# Altium schematic symbol library Connector-2.SchLib: 96 symbols (part 2 of 2)
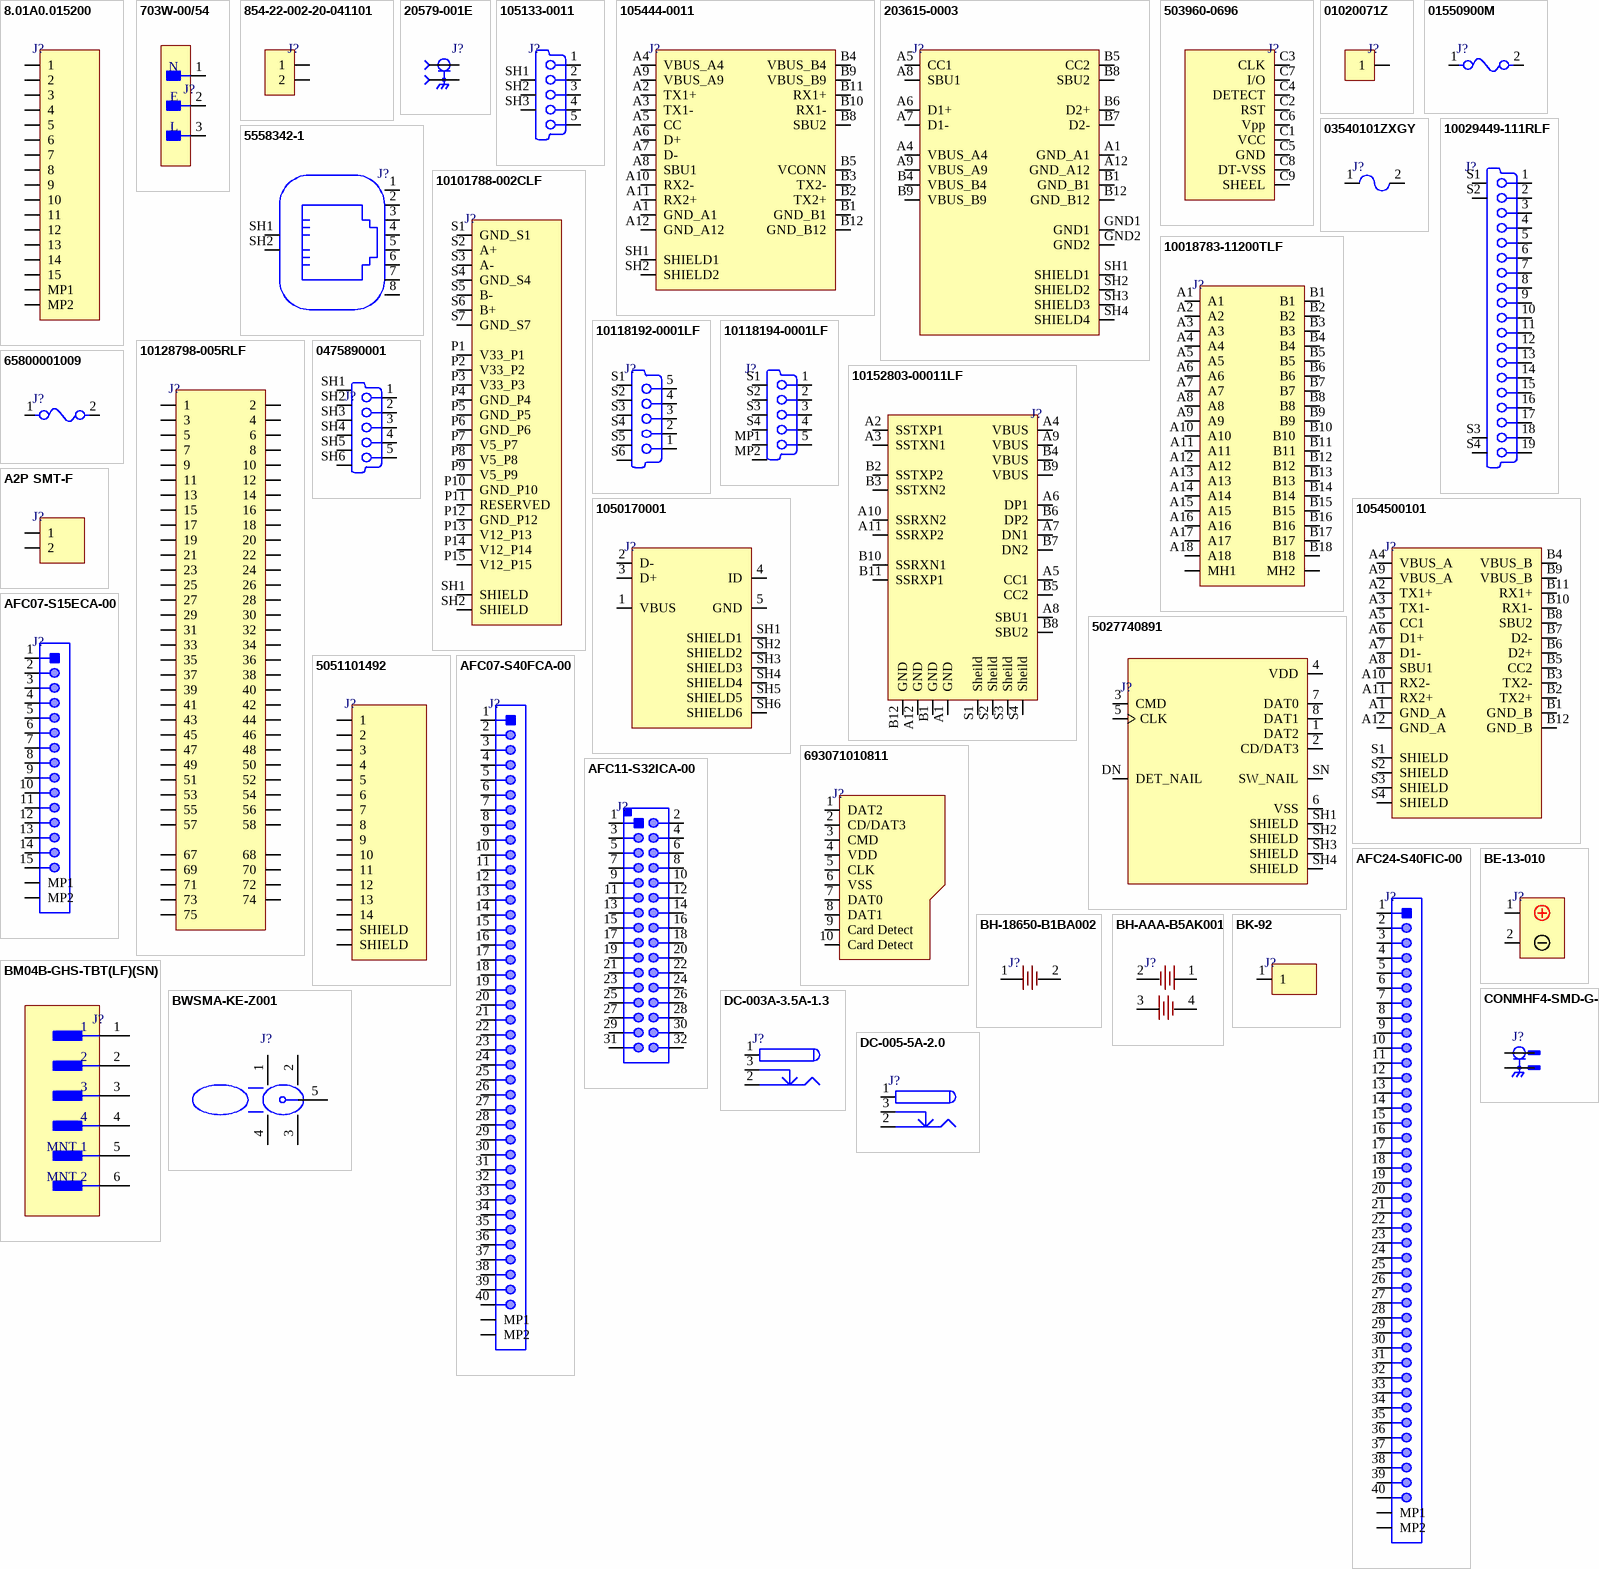
[diagram p3: symbols 8.01A0.015200 to DC-005-5A-2.0]

## BM04B-GHS-TBT(LF)(SN)
designator J?
CONN HEADER SMD 4POS 1.25MM; Manufacturer: JST; Manufacturer Part Number: BM04B-GHS-TBT(LF)(SN); Item Type: Card Edge Connectors; Contact Resistance: 50mΩ; Current Rating: 1A; Gender: Male; Insulation Resistance: 100MΩ; Number of Contacts: 4; Voltage Rating: 50V; Wire/Cable Gauge: 26AWG; Supplier: Future Electronics; Supplier Part Number: 7604226; RoHS: Compliant; Pricing: 2500=0.205, 5000=0.2, 7500=0.199, 10000=0.197 (USD); Case/Package: SMD/SMT; China RoHS: Compliant; Contact Gender: Male; Contact Material: Tin; Contact Plating: Tin; Height: 4.05mm; Housing Color: Natural; Housing Material: Nylon; Lead Free: Lead Free; Lifecycle Status: Production; Max Operating Temperature: 85°C; Min Operating Temperature: -25°C; Pins: 4; Number of Positions: 4; Number of Rows: 1; Orientation: Straight; Packaging: Cut Tape; Pitch: 1.25mm; REACH SVHC: No; Schedule B: 8536694040; Terminal Pitch: 1.25mm; Termination: Crimp; Voltage Rating (AC): 50V; ComponentLink1URL: https://datasheet.octopart.com:443/BM04B-GHS-TBT%28LF%29%28SN%29-JST-datasheet-151632282.pdf?src-supplier=IHS; ComponentLink1Description: https://datasheet.octopart.com:443/BM04B-GHS-TBT%28LF%29%28SN%29-JST-datasheet-151632282.pdf?src-supplier=IHS; ComponentLink2URL: https://datasheet.octopart.com:443/BM04B-GHS-TBT%28LF%29%28SN%29-JST-datasheet-13551083.pdf?src-supplier=Future+Electronics; ComponentLink2Description: https://datasheet.octopart.com:443/BM04B-GHS-TBT%28LF%29%28SN%29-JST-datasheet-13551083.pdf?src-supplier=Future+Electronics; ComponentLink3URL: https://datasheet.octopart.com:443/BM04B-GHS-TBT%28LF%29%28SN%29-JST-datasheet-12527556.pdf?src-supplier=Future+Electronics; ComponentLink3Description: https://datasheet.octopart.com:443/BM04B-GHS-TBT%28LF%29%28SN%29-JST-datasheet-12527556.pdf?src-supplier=Future+Electronics; ComponentLink4URL: https://datasheet.octopart.com:443/BM04B-GHS-TBT%28LF%29%28SN%29-JST-datasheet-10511.pdf?src-supplier=DigiKey; ComponentLink4Description: https://datasheet.octopart.com:443/BM04B-GHS-TBT%28LF%29%28SN%29-JST-datasheet-10511.pdf?src-supplier=DigiKey
footprint BM04B-GHS-TBT
pins: 1, 2, 3, 4, 5 MNT 1, 6 MNT 2

## BWSMA-KE-Z001
designator J?
1 Inner Bore SMA Board Side Positive Pin -65℃~+165℃ 50Ω Through Hole Coaxial Connector (RF) Assemblies RoHS; Manufacturer: BAT WIRELESS; Manufacturer Part Number: BWSMA-KE-Z001; Package: Custom; LCSC Part Number: C496549; Item Type: Connector; ComponentLink1Description: LCSC; ComponentLink1URL: https://www.lcsc.com/product-detail/C496549.html
footprint BWSMA-KE-Z001
pins: 1, 2, 3, 4, 5

## CONMHF4-SMD-G-T
designator J?
CONN MHF4 JACK STR SMD; Manufacturer: TE Connectivity; Manufacturer Part Number: CONMHF4-SMD-G-T; Item Type: Connectors; Number of Positions: 1; Supplier: Mouser; Supplier Part Number: 712-CONMHF4-SMD-G-T; RoHS: No; Stock: 14009; Pricing: 1=0.35, 10=0.35, 50=0.35, 100=0.345, 1000=0.26, 10000=0.26 (USD)
footprint CONMHF4-SMD-G-T
pins: 1, S1 2, S2 2, S3 2

## DC-003A-3.5A-1.3
designator J?
Bend insert DC Power Receptacle -20℃~+70℃ 1.3mm 5mm 3.5A 24V Plugin DC Power Connectors ROHS; Manufacturer: XKB Connection; Manufacturer Part Number: DC-003A-3.5A-1.3; Item Type: DC Connector; Package: Plugin; LCSC Part Number: C779945; ComponentLink1Description: LCSC; ComponentLink1URL: https://www.lcsc.com/product-detail/DC-Power-Connectors_XKB-Connection-DC-003A-3-5A-1-3_C779945.html
footprint DC-003A-3.5A-1.3
pins: 1 (power), 2 (power), 3 (power)

## DC-005-5A-2.0
designator J?
Bend insert DC Power Receptacle -20℃~+70℃ 2mm 6.2mm 5A 24V Plugin DC Power Connectors ROHS; Manufacturer: XKB Connection; Manufacturer Part Number: DC-005-5A-2.0; Item Type: DC Connector; Package: Plugin; LCSC Part Number: C381116; ComponentLink1Description: LCSC; ComponentLink1URL: https://www.lcsc.com/product-detail/DC-Power-Connectors_XKB-Connection-DC-005-5A-2-0_C381116.html
footprint DC-005-5A-2.0
pins: 1 (power), 2 (power), 3 (power)

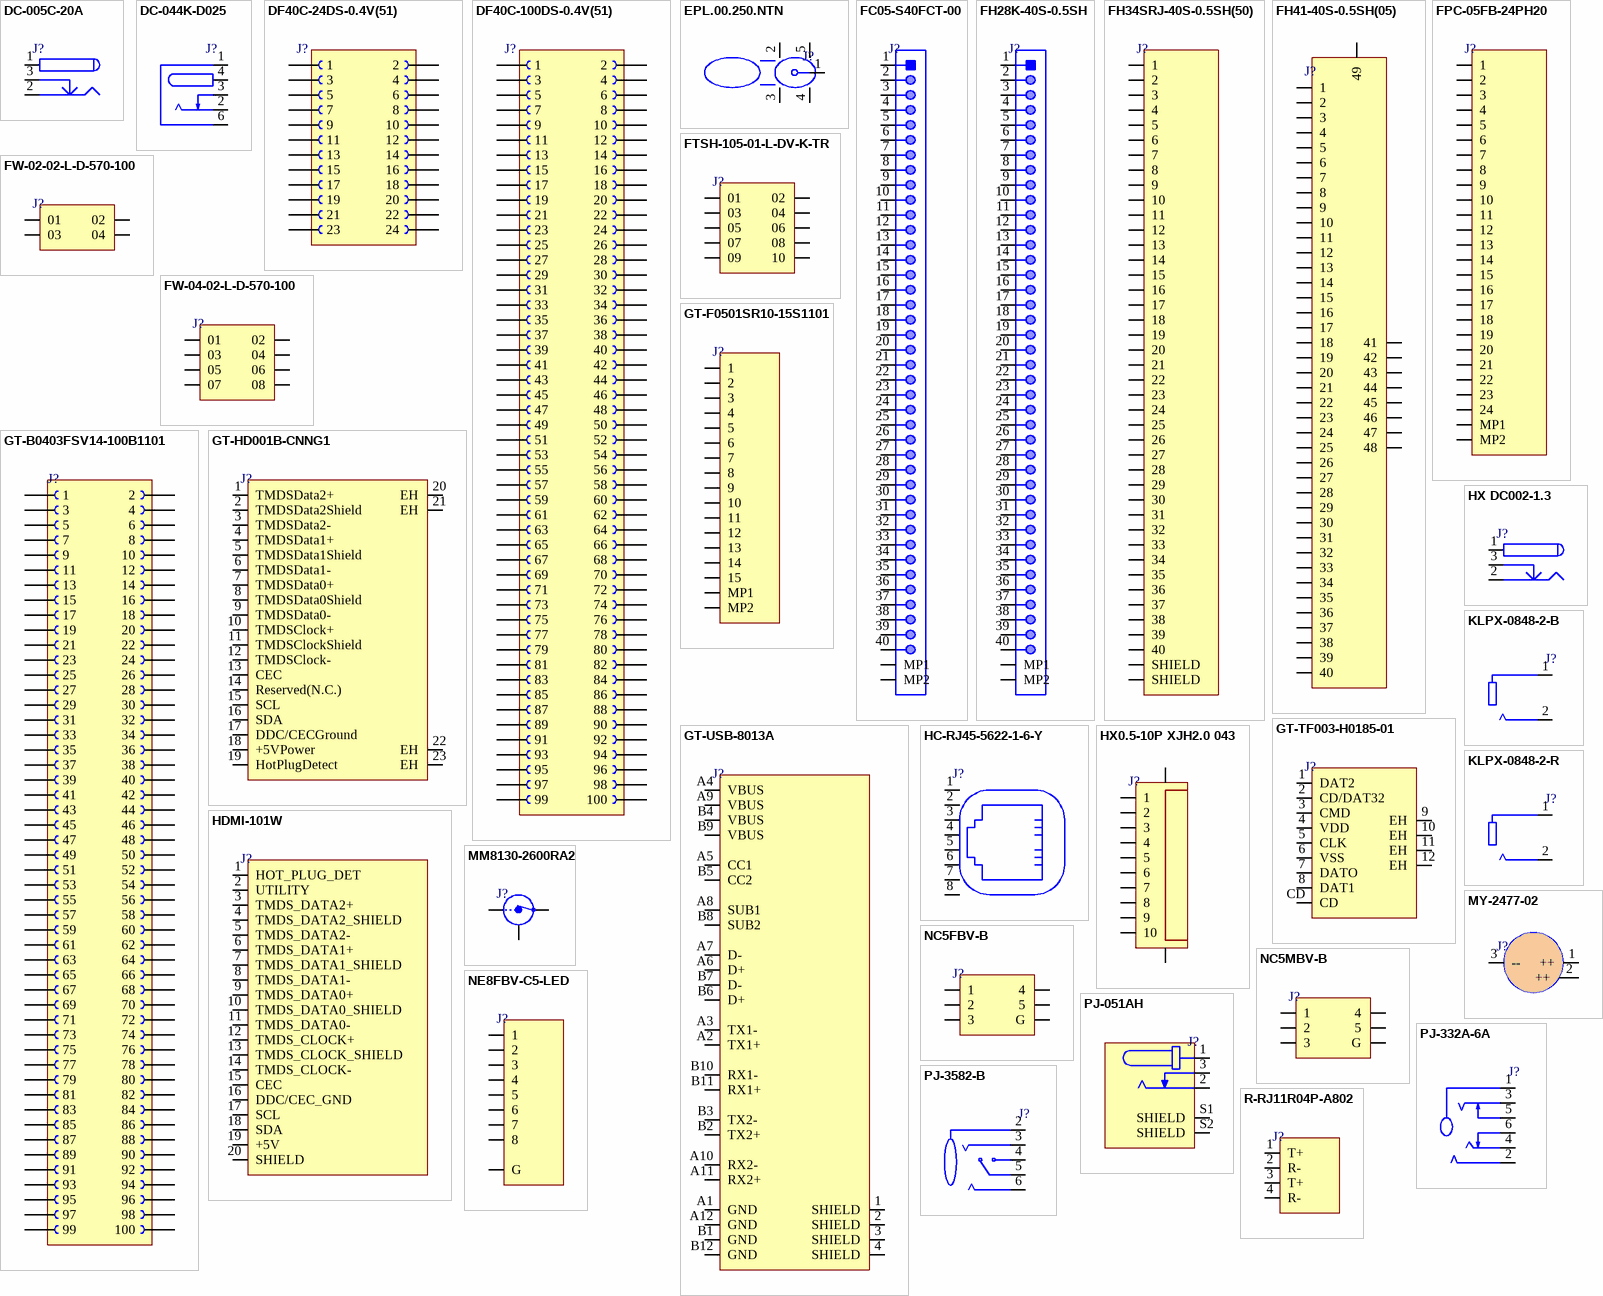
[diagram p1: symbols DC-005C-20A to R-RJ11R04P-A802]

## DC-005C-20A
designator J?
Bend insert DC Power Receptacle -20℃~+70℃ 2mm 6.4mm 3A 24V Plugin DC Power Connectors ROHS; Manufacturer: Korean Hroparts Elec; Manufacturer Part Number: DC-005C-20A; Item Type: DC Connector; Package: Plugin; LCSC Part Number: C84007; ComponentLink1Description: LCSC; ComponentLink1URL: https://www.lcsc.com/product-detail/DC-Power-Connectors_Korean-Hroparts-Elec-DC-005C-20A_C84007.html
footprint DC-005C-20A
pins: 1 (power), 2 (power), 3 (power)

## DC-044K-D025
designator J?
Bend insert DC Power Receptacle -30℃~+85℃ 2.5mm 6mm 7A 24V Plugin DC Power Connectors ROHS; Manufacturer: G-Switch; Manufacturer Part Number: DC-044K-D025; Package: Plugin; LCSC Part Number: C963204; Item Type: DC Power Connectors; ComponentLink1Description: LCSC; ComponentLink1URL: https://www.lcsc.com/product-detail/DC-Power-Connectors_G-Switch-DC-044K-D025_C963204.html
footprint DC-044K-D025
pins: 1, 2, 3, 4, 6

## DF40C-24DS-0.4V(51)
designator J?
CONN RCPT 24POS SMD GOLD; Manufacturer: Hirose; Manufacturer Part Number: DF40C-24DS-0.4V(51); Item Type: Connectors; Contact Resistance: 90mR; Contact Voltage Rating (AC): 30V; Contact Pitch: 400um; Supplier: Digikey; LCSC Part Number: C424640; RoHS: Yes; Stock: 2445; Pricing: 1=0.64, 10=0.518, 25=0.4772, 50=0.4486, 100=0.4218, 250=0.3888, 500=0.36562, 1000=0.34382, 2500=0.317 (USD); Housing Color: 46Colour; Contact Voltage Rating (DC): 30V; Orientation: 5491OrientationType; Length: 7.4mm; Width: 3.38mm; Height: 1.45mm; Lead Free: 5697LeadFree; ComponentLink1URL: https://datasheet.ciiva.com/46408/1824826-46408901.pdf?src-supplier=Element14; ComponentLink1Description: https://datasheet.ciiva.com/46408/1824826-46408901.pdf?src-supplier=Element14
footprint DF40C-24DS-0.4V(51)
pins: 1, 2, 3, 4, 5, 6, 7, 8, 9, 10, 11, 12, 13, 14, 15, 16, 17, 18, 19, 20, 21, 22, 23, 24

## DF40C-100DS-0.4V(51)
designator J?
CONN RCPT 100POS SMD GOLD; Manufacturer: Hirose; Manufacturer Part Number: DF40C-100DS-0.4V(51); Item Type: Card Edge Connectors; Contact Resistance: 90mR; Voltage Rating: 30V; Current Rating: 300mA; Connector Type: Receptacle; Number of Positions: 100; Pitch: 0.4mm; Mated Stacking Heights: 1.5mm; Contact Pitch: 400um; LCSC Part Number: C597931; ComponentLink1URL: https://datasheet.ciiva.com/11746/0900766b80e0bfd2-11746269.pdf?src-supplier=Rs; ComponentLink1Description: https://datasheet.ciiva.com/11746/0900766b80e0bfd2-11746269.pdf?src-supplier=Rs; ComponentLink2URL: https://datasheet.ciiva.com/46408/1824826-46408902.pdf?src-supplier=Element14; ComponentLink2Description: https://datasheet.ciiva.com/46408/1824826-46408902.pdf?src-supplier=Element14; Supplier: Avnet; Supplier Part Number: DF40C-100DS-0.4V(51); RoHS: Yes; Stock: 5000; Pricing: 5000=0.98765 (USD); Mounting Technology: Surface Mount; Contact Material: Bronze; Contact Plating: Gold; Housing Color: Black; Housing Material: Polymer; Min Operating Temperature: -35°C; Max Operating Temperature: 85°C; Number of Rows: 2; Packaging: Tape and Reel; Package Quantity: 1; Termination: SMD/SMT; Number of Contacts: 100; Orientation: Straight; Series: DF40; Contact Voltage Rating (AC): 30V; Contact Voltage Rating (DC): 30V; Max Current Rating: 300mA; Max Voltage Rating (AC): 30V; Gender: Receptacle; Length: 22.6mm; Depth: 3.38mm; Radiation Hardening: No; Reach SVHC Compliant: No; Lead Free: Lead Free; RoHS Compliant: Yes; ComponentLink3URL: https://datasheet.ciiva.com/26948/getdatasheetpartid-441624-26948933.pdf?src-supplier=Verical; ComponentLink3Description: https://datasheet.ciiva.com/26948/getdatasheetpartid-441624-26948933.pdf?src-supplier=Verical; ComponentLink4URL: https://datasheet.ciiva.com/46408/1824826-46408894.pdf?src-supplier=Element14; ComponentLink4Description: https://datasheet.ciiva.com/46408/1824826-46408894.pdf?src-supplier=Element14
footprint DF40C-100DS-0.4V(51)
pins: 1, 2, 3, 4, 5, 6, 7, 8, 9, 10, 11, 12, 13, 14, 15, 16, 17, 18, 19, 20, 21, 22, 23, 24, 25, 26, 27, 28, 29, 30, 31, 32, 33, 34, 35, 36, 37, 38, 39, 40, 41, 42, 43, 44, 45, 46, 47, 48, 49, 50, 51, 52, 53, 54, 55, 56, 57, 58, 59, 60, 61, 62, 63, 64, 65, 66, 67, 68, 69, 70, 71, 72, 73, 74, 75, 76, 77, 78, 79, 80, 81, 82, 83, 84, 85, 86, 87, 88, 89, 90, 91, 92, 93, 94, 95, 96, 97, 98, 99, 100

## EPL.00.250.NTN
designator J?
CONN NIMCAMAC RCPT R/A 50OHM PCB; Manufacturer: LEMO; Manufacturer Part Number: EPL.00.250.NTN; Item Type: RF / Coaxial Connectors; Insulation Resistance: 1.012kR; Voltage Rating (DC): 700V; Supplier: Mouser; Supplier Part Number: 736-EPL00250NTN; RoHS: Yes; Stock: 2913; Pricing: 1=21.95, 10=18.15, 50=16.05, 100=14.79, 1000=13.95, 10000=13.95 (USD); Insulation Material: 5766ConductorMaterial; ComponentLink1URL: https://datasheet.ciiva.com/7638/1775425-7638845.pdf?src-supplier=Element14; ComponentLink1Description: https://datasheet.ciiva.com/7638/1775425-7638845.pdf?src-supplier=Element14; ComponentLink2URL: https://datasheet.ciiva.com/646/epl-00-250-ntn-646197.pdf?src-supplier=Digikey; ComponentLink2Description: https://datasheet.ciiva.com/646/epl-00-250-ntn-646197.pdf?src-supplier=Digikey
footprint EPL.00.250.NTN
pins: 1, 2, 3, 4, 5

## FC05-S40FCT-00
designator J?
SMD,P=0.5mm,Surface Mount，Right Angle; Manufacturer: DEALON; Manufacturer Part Number: FC05-S40FCT-00; Item Type: FFC, FPC Connector; Package: SMD,P=0.5mm,Surface Mount，Right Angle; LCSC Part Number: C2998841; ComponentLink1Description: LCSC; ComponentLink1URL: https://www.lcsc.com/product-detail/FFC-FPC-Flat-Flexible-Connector-Assemblies_DEALON-FC05-S40FCT-00_C2998841.html
footprint FC05-S40FCT-00_
pins: 1, 2, 3, 4, 5, 6, 7, 8, 9, 10, 11, 12, 13, 14, 15, 16, 17, 18, 19, 20, 21, 22, 23, 24, 25, 26, 27, 28, 29, 30, 31, 32, 33, 34, 35, 36, 37, 38, 39, 40, MP1, MP2

## FH28K-40S-0.5SH
designator J?
SMD,P=0.5mm,Surface Mount,Right Angle; Manufacturer: HRS; Manufacturer Part Number: FH28K-40S-0.5SH; Item type: Connector; Package: SMD, P=0.5mm; LCSC Part Number: C3169685
footprint FH28K-40S-0.5SH
pins: 1, 2, 3, 4, 5, 6, 7, 8, 9, 10, 11, 12, 13, 14, 15, 16, 17, 18, 19, 20, 21, 22, 23, 24, 25, 26, 27, 28, 29, 30, 31, 32, 33, 34, 35, 36, 37, 38, 39, 40, MP1, MP2

## FH34SRJ-40S-0.5SH(50)
designator J?
CONN FFC FPC 40POS 0.5MM R/A; Manufacturer: Hirose; Manufacturer Part Number: FH34SRJ-40S-0.5SH(50); Item Type: FFC / FPC Connector; Actuator Material: Nylon,Polyamide; Actuator Color: Black; Number of Positions: 40; Voltage Rating: 50V; Current Rating: 500mA; Mating Cycles: 20; Pitch: 0.02inch; Supplier: Digikey; LCSC Part Number: C506798; RoHS: Yes; Stock: 2275; Pricing: 1=1.39, 10=1.129, 25=1.0408, 50=0.9788, 100=0.9203, 250=0.84848, 500=0.7979, 1000=0.75036, 2500=0.69185 (USD); Mounting Technology: Surface Mount; Pins: 40; Contact Material: Bronze; Contact Plating: Gold; Housing Material: Polymer; Housing Color: Grey; Min Operating Temperature: -55°C; Max Operating Temperature: 85°C; Packaging: Tape and Reel; Termination: Solder; Series: FH34SRJ; Flammability Rating: UL94 V-0; Lead Free: Lead Free; RoHS Compliant: Yes; ComponentLink1URL: https://datasheet.octopart.com/FH34SRJ-40S-0.5SH%2850%29-Hirose-datasheet-136412957.pdf?src-supplier=Future+Electronics; ComponentLink1Description: https://datasheet.octopart.com/FH34SRJ-40S-0.5SH%2850%29-Hirose-datasheet-136412957.pdf?src-supplier=Future+Electronics; ComponentLink2URL: https://www.hirose.com/product/download/?distributor=digikey&amp;type=2d&amp;lang=en&amp;num=FH34SRJ-40S-0.5SH(50)&src-supplier=Digikey; ComponentLink2Description: https://www.hirose.com/product/download/?distributor=digikey&amp;type=2d&amp;lang=en&amp;num=FH34SRJ-40S-0.5SH(50)&src-supplier=Digikey; ComponentLink3URL: https://www.hirose.com/product/document?clcode=CL0580-1251-5-99&amp;productname=FH34SRJ-10S-0.5SH(99)&amp;series=FH34SRJ&amp;documenttype=Catalog&amp;lang=en&amp;documentid=D31646_en&src-supplier=Digikey; ComponentLink3Description: https://www.hirose.com/product/document?clcode=CL0580-1251-5-99&amp;productname=FH34SRJ-10S-0.5SH(99)&amp;series=FH34SRJ&amp;documenttype=Catalog&amp;lang=en&amp;documentid=D31646_en&src-supplier=Digikey
footprint FH34SRJ-40S-0.5SH(50)
pins: 1, 2, 3, 4, 5, 6, 7, 8, 9, 10, 11, 12, 13, 14, 15, 16, 17, 18, 19, 20, 21, 22, 23, 24, 25, 26, 27, 28, 29, 30, 31, 32, 33, 34, 35, 36, 37, 38, 39, 40, S1 SHIELD, S2 SHIELD

## FH41-40S-0.5SH(05)
designator J?
CONN FFC BOTTOM 40POS 0.5MM R/A; Manufacturer: Hirose; Manufacturer Part Number: FH41-40S-0.5SH(05); Item Type: Card Edge Connectors; Connector Type: 4640ConnectorType; Supplier: Digikey; LCSC Part Number: C596805; RoHS: Yes; Stock: 4133; Pricing: 1=2.72, 10=2.313, 25=2.1676, 50=2.064, 100=1.9654, 250=1.84232, 500=1.75438, 1000=1.7289 (USD); Length: 24mm; Width: 6.2mm; Height: 2.5mm; RoHS Compliant: 5897YesNo; ComponentLink1URL: https://datasheet.ciiva.com/11745/0900766b80fce72e-11745604.pdf?src-supplier=Rs; ComponentLink1Description: https://datasheet.ciiva.com/11745/0900766b80fce72e-11745604.pdf?src-supplier=Rs; ComponentLink2URL: https://datasheet.ciiva.com/7989/1512288-7989402.pdf?src-supplier=Element14; ComponentLink2Description: https://datasheet.ciiva.com/7989/1512288-7989402.pdf?src-supplier=Element14; ComponentLink3URL: https://datasheet.ciiva.com/5772/1512288-5772907.pdf?src-supplier=Farnell; ComponentLink3Description: https://datasheet.ciiva.com/5772/1512288-5772907.pdf?src-supplier=Farnell
footprint FH41-40S-0.5SH(05)
pins: 1, 2, 3, 4, 5, 6, 7, 8, 9, 10, 11, 12, 13, 14, 15, 16, 17, 18, 19, 20, 21, 22, 23, 24, 25, 26, 27, 28, 29, 30, 31, 32, 33, 34, 35, 36, 37, 38, 39, 40, 41, 42, 43, 44, 45, 46, 47, 48, 49

## FPC-05FB-24PH20
designator J?
Hinged Lid -25℃~+85℃ 24P Double-Sided Contacts, Top and Bottom Entry Surface Mount, Right Angle 0.5mm SMD,P=0.5mm,Surface Mount，Right Angle FFC, FPC (Flat Flexible) Connector Assemblies ROHS; Manufacturer: XUNPU; Manufacturer Part Number: FPC-05FB-24PH20; Item Type: FPC Connector; Package: SMD,P=0.5mm,Surface Mount，Right Angle; LCSC Part Number: C2856831; ComponentLink1Description: LCSC; ComponentLink1URL: https://lcsc.com/product-detail/FFC-FPC-Flat-Flexible-Connector-Assemblies_XUNPU-FPC-05FB-24PH20_C2856831.html?s_z=n_C2856831%2520
footprint FPC-05FB-24PH20
pins: 1, 2, 3, 4, 5, 6, 7, 8, 9, 10, 11, 12, 13, 14, 15, 16, 17, 18, 19, 20, 21, 22, 23, 24, MP1, MP2

## FTSH-105-01-L-DV-K-TR
designator J?
CONN HEADER SMD 10POS 1.27MM SWD Connector; Manufacturer: Samtec; Manufacturer Part Number: FTSH-105-01-L-DV-K-TR; Supplier: Digikey; LCSC Part Number: C448647; RoHS: Yes; Item Type: Header; Stock: 9031; Pricing: 1=2.58, 100=2.03, 250=1.83 (USD); ComponentLink1URL: https://datasheet.ciiva.com/23735/81359-23735917.pdf?src-supplier=Newark; ComponentLink1Description: https://datasheet.ciiva.com/23735/81359-23735917.pdf?src-supplier=Newark; ComponentLink2URL: https://datasheet.ciiva.com/10245/ftsh-mt-10245289.pdf?src-supplier=Avnet; ComponentLink2Description: https://datasheet.ciiva.com/10245/ftsh-mt-10245289.pdf?src-supplier=Avnet; ComponentLink3URL: https://datasheet.ciiva.com/739/ftsh-1xx-xx-xxx-dv-xxx-mkt-739005.pdf?src-supplier=Digikey; ComponentLink3Description: https://datasheet.ciiva.com/739/ftsh-1xx-xx-xxx-dv-xxx-mkt-739005.pdf?src-supplier=Digikey
footprint FTSH-105-01-L-DV-K-TR
pins: 01, 02, 03, 04, 05, 06, 07, 08, 09, 10

## FW-02-02-L-D-570-100
designator J?
Flex Stack Micro Board Stacker, 1.27 mm Pitch. 2 Row 2 Pos; Manufacturer: Samtec; Manufacturer Part Number: FW-02-02-L-D-570-100; Item Type: Connector; Package: TH, P=1.27mm
footprint FW-02-02-L-D-570-100
pins: 01, 02, 03, 04

## FW-04-02-L-D-570-100
designator J?
Flex Stack Micro Board Stacker, 1.27 mm Pitch. 2 Row, 4 Pos; Manufacturer: Samtec; Manufacturer Part Number: FW-04-02-L-D-570-100; Item Type: Connector; Package: TH, P=1.27mm
footprint FW-04-02-L-D-570-100
pins: 01, 02, 03, 04, 05, 06, 07, 08

## GT-B0403FSV14-100B1101
designator J?
0.4mm 2 100P -55℃~+125℃ Standing paste 0.3A SMD,P=0.4mm Board-to-Board and Backplane Connector ROHS; Manufacturer: G-Switch; Manufacturer Part Number: GT-B0403FSV14-100B1101; Package: SMD,P=0.4mm; LCSC Part Number: C42376244; Item Type: Connector; ComponentLink1Description: LCSC; ComponentLink1URL: https://www.lcsc.com/product-detail/Board-to-Board-and-Backplane-Connector_G-Switch-GT-B0403FSV14-100B1101_C42376244.html
footprint GT-B0403FSV14-100B1101
pins: 1, 2, 3, 4, 5, 6, 7, 8, 9, 10, 11, 12, 13, 14, 15, 16, 17, 18, 19, 20, 21, 22, 23, 24, 25, 26, 27, 28, 29, 30, 31, 32, 33, 34, 35, 36, 37, 38, 39, 40, 41, 42, 43, 44, 45, 46, 47, 48, 49, 50, 51, 52, 53, 54, 55, 56, 57, 58, 59, 60, 61, 62, 63, 64, 65, 66, 67, 68, 69, 70, 71, 72, 73, 74, 75, 76, 77, 78, 79, 80, 81, 82, 83, 84, 85, 86, 87, 88, 89, 90, 91, 92, 93, 94, 95, 96, 97, 98, 99, 100

## GT-F0501SR10-15S1101
designator J?
SMD,P=0.5mm,Surface Mount，Right Angle; Manufacturer: G-Switch; Manufacturer Part Number: GT-F0501SR10-15S1101; Item Type: Right Angle FFC, FPC Connector; Package: SMD,P=0.5mm,Surface Mount，Right Angle; LCSC Part Number: C22380682; ComponentLink1Description: LCSC; ComponentLink1URL: https://www.lcsc.com/product-detail/FFC-FPC-Flat-Flexible-Connector-Assemblies_G-Switch-GT-F0501SR10-15S1101_C22380682.html
footprint GT-F0501SR10-15S1101
pins: 1, 2, 3, 4, 5, 6, 7, 8, 9, 10, 11, 12, 13, 14, 15, MP1, MP2

## GT-HD001B-CNNG1
designator J?
SMD HDMI Connectors ROHS; Manufacturer: G-Switch; Manufacturer Part Number: GT-HD001B-CNNG1; Package: SMD; LCSC Part Number: C27636747; Item Type: HDMI Connector; ComponentLink1Description: LCSC; ComponentLink1URL: https://www.lcsc.com/product-detail/HDMI-Connectors_G-Switch-GT-HD001B-CNNG1_C27636747.html
footprint GT-HD001B-CNNG1
pins: 1 TMDSData2+, 2 TMDSData2Shield, 3 TMDSData2-, 4 TMDSData1+, 5 TMDSData1Shield, 6 TMDSData1-, 7 TMDSData0+, 8 TMDSData0Shield, 9 TMDSData0-, 10 TMDSClock+, 11 TMDSClockShield, 12 TMDSClock-, 13 CEC, 14 Reserved(N.C.), 15 SCL, 16 SDA, 17 DDC/CECGround, 18 +5VPower, 19 HotPlugDetect, 20 EH, 21 EH, 22 EH, 23 EH

## GT-TF003-H0185-01
designator J?
-40℃~+90℃ 1.85mm Card Slot MicroSD card (TF card) Self-bouncing SMD SD Card / Memory Card Connector ROHS; Manufacturer: G-Switch; Manufacturer Part Number: GT-TF003-H0185-01; Item Type: SD Card Connector; Package: SMD; LCSC Part Number: C5155563; ComponentLink1Description: LCSC; ComponentLink1URL: https://lcsc.com/product-detail/SD-Card-Memory-Card-Connector_G-Switch-GT-TF003-H0185-01_C5155563.html?s_z=n_GT-TF003-H0185-01
footprint GT-TF003-H0185-01
pins: 1 DAT2, 2 CD/DAT32, 3 CMD, 4 VDD, 5 CLK, 6 VSS, 7 DATO, 8 DAT1, 9 EH, 10 EH, 11 EH, 12 EH, CD

## GT-USB-8013A
designator J?
5A USB 3.1 1 Horizontal attachment 24P Male -40℃~+85℃ Type-C SMD USB Connectors ROHS; Manufacturer: G-Switch; Manufacturer Part Number: GT-USB-8013A; Package: SMD; LCSC Part Number: C2988370; Item Type: Connector; ComponentLink1Description: LCSC; ComponentLink1URL: https://www.lcsc.com/product-detail/span-style-background-color-ff0-USB-span-Connectors_G-Switch-GT-USB-8013A_C2988370.html
footprint GT-USB-8013A
pins: 1 SHIELD, 2 SHIELD, 3 SHIELD, 4 SHIELD, A1 GND, A2 TX1+, A3 TX1-, A4 VBUS, A5 CC1, A6 D+, A7 D-, A8 SUB1, A9 VBUS, A10 RX2-, A11 RX2+, A12 GND, B1 GND, B2 TX2+, B3 TX2-, B4 VBUS, B5 CC2, B6 D+, B7 D-, B8 SUB2, B9 VBUS, B10 RX1-, B11 RX1+, B12 GND

## HC-RJ45-5622-1-6-Y
designator J?
RJ45Receptacle Unshielded 1 Bend-in Gold Phosphor Bronze Without LED Plugin Ethernet Connectors / Modular Connectors (RJ45 RJ11) ROHS; Manufacturer: HCTL; Manufacturer Part Number: HC-RJ45-5622-1-6-Y; Package: Custom; LCSC Part Number: C3000205; Item Type: Ethernet Connectors; ComponentLink1Description: LCSC; ComponentLink1URL: https://www.lcsc.com/product-detail/Ethernet-Connectors-Modular-Connectors-RJ45-RJ11_HCTL-HC-RJ45-5622-1-6-Y_C3000205.html
footprint HC-RJ45-5622-1-6-Y
pins: 1, 2, 3, 4, 5, 6, 7, 8

## HDMI-101W
designator J?
SMD HDMI Connectors ROHS; Manufacturer: XUNPU; Manufacturer Part Number: HDMI-101W; Package: SMD; LCSC Part Number: C720619; Item Type: Connector; ComponentLink1Description: LCSC; ComponentLink1URL: https://www.lcsc.com/product-detail/HDMI-Connectors_XUNPU-HDMI-101W_C720619.html
footprint HDMI-101W
pins: 1 HOT_PLUG_DET, 2 UTILITY, 3 TMDS_DATA2+, 4 TMDS_DATA2_SHIELD, 5 TMDS_DATA2-, 6 TMDS_DATA1+, 7 TMDS_DATA1_SHIELD, 8 TMDS_DATA1-, 9 TMDS_DATA0+, 10 TMDS_DATA0_SHIELD, 11 TMDS_DATA0-, 12 TMDS_CLOCK+, 13 TMDS_CLOCK_SHIELD, 14 TMDS_CLOCK-, 15 CEC, 16 DDC/CEC_GND, 17 SCL, 18 SDA, 19 +5V, 20 SHIELD

## HX0.5-10P XJH2.0 043
designator J?
Flip type 10P Bottom Contact Horizontal attachment 0.5mm SMD,P=0.5mm FFC, FPC (Flat Flexible) Connector Assemblies ROHS; Manufacturer: hanxia; Manufacturer Part Number: HX0.5-10P XJH2.0 043; Item Type: FFC/FPC Cable; Package: SMD,P=0.5mm; LCSC Part Number: C5691101; ComponentLink1Description: LCSC; ComponentLink1URL: https://www.lcsc.com/product-detail/FFC-FPC-Flat-Flexible-Connector-Assemblies_hanxia-HX0-5-10P-XJH2-0-043_C5691101.html?s_z=n_HX0.5-10P%20XJH2.0%20043
footprint HX0.5-10P XJH2.0 043
pins: 1, 2, 3, 4, 5, 6, 7, 8, 9, 10, MP1, MP2

## HX DC002-1.3
designator J?
Right Angle DC Power Jack -40℃~+55℃ 500mA 30V Through Hole DC Power Connectors ROHS; Manufacturer: hanxia; Manufacturer Part Number: HX DC002-1.3; Item Type: DC Connector; Package: Plugin; LCSC Part Number: C5184827; ComponentLink1Description: LCSC; ComponentLink1URL: https://www.lcsc.com/product-detail/C5184827.html?s_z=n_DC002-1.3
footprint HX DC002-1.3
pins: 1 (power), 2 (power), 3 (power)

## KLPX-0848-2-B
designator J?
RCA PHONO JACK, VERTICAL, BLK RO; Manufacturer: Kycon; Manufacturer Part Number: KLPX-0848-2-B; Item Type: Connectors; Supplier: Digikey; Supplier Part Number: 2092-KLPX-0848-2-B-ND; RoHS: Yes; Stock: 3463; Pricing: 1=0.98, 10=0.826, 25=0.7928, 50=0.7758, 100=0.7421, 250=0.67468, 500=0.60722, 1000=0.53974, 2500=0.48914 (USD); ComponentLink1URL: http://www.mouser.com/ds/2/222/KLPX-334830.pdf?src-supplier=Mouser; ComponentLink1Description: http://www.mouser.com/ds/2/222/KLPX-334830.pdf?src-supplier=Mouser; ComponentLink2URL: http://domino2.kycon.com/catalog_PDF/Standard%20Catalog%20page/RCA%20Phono%20Jacks/SKLPX.pdf?src-supplier=Avnet; ComponentLink2Description: http://domino2.kycon.com/catalog_PDF/Standard%20Catalog%20page/RCA%20Phono%20Jacks/SKLPX.pdf?src-supplier=Avnet; ComponentLink3URL: http://www.kycon.com/2013Catalogpage/RCA/KLPX.pdf?src-supplier=Digikey; ComponentLink3Description: http://www.kycon.com/2013Catalogpage/RCA/KLPX.pdf?src-supplier=Digikey; ComponentLink4URL: https://datasheet.octopart.com/KLPX-0848-2-B-Kycon-datasheet-116534117.pdf?src-supplier=Toby+Electronics; ComponentLink4Description: https://datasheet.octopart.com/KLPX-0848-2-B-Kycon-datasheet-116534117.pdf?src-supplier=Toby+Electronics
footprint KLPX-0848-2-B
pins: 1, 2

## KLPX-0848-2-R
designator J?
RCA PHONO JACK, VERTICAL, RED RO; Manufacturer: Kycon; Manufacturer Part Number: KLPX-0848-2-R; Item Type: Connectors; Supplier: Digikey; Supplier Part Number: 2092-KLPX-0848-2-R-ND; RoHS: Yes; Stock: 613; Pricing: 1=1.16, 10=0.885, 25=0.7956, 50=0.7348, 100=0.6795, 250=0.61388, 500=0.5695, 1000=0.52924, 2500=0.48174 (USD); ComponentLink1URL: http://www.mouser.com/ds/2/222/KLPX-334830.pdf?src-supplier=Mouser; ComponentLink1Description: http://www.mouser.com/ds/2/222/KLPX-334830.pdf?src-supplier=Mouser; ComponentLink2URL: http://domino2.kycon.com/catalog_PDF/Standard%20Catalog%20page/RCA%20Phono%20Jacks/SKLPX.pdf?src-supplier=Avnet; ComponentLink2Description: http://domino2.kycon.com/catalog_PDF/Standard%20Catalog%20page/RCA%20Phono%20Jacks/SKLPX.pdf?src-supplier=Avnet; ComponentLink3URL: http://www.kycon.com/2013Catalogpage/RCA/KLPX.pdf?src-supplier=Digikey; ComponentLink3Description: http://www.kycon.com/2013Catalogpage/RCA/KLPX.pdf?src-supplier=Digikey; ComponentLink4URL: https://datasheet.octopart.com/KLPX-0848-2-R-Kycon-datasheet-116534117.pdf?src-supplier=Toby+Electronics; ComponentLink4Description: https://datasheet.octopart.com/KLPX-0848-2-R-Kycon-datasheet-116534117.pdf?src-supplier=Toby+Electronics
footprint KLPX-0848-2-R
pins: 1, 2

## MM8130-2600RA2
designator J?
CONN SWF RCPT STR 50 OHM SMD; Manufacturer: Murata; Manufacturer Part Number: MM8130-2600RA2; Item Type: RF / Coaxial Connectors; Supplier: Future Electronics; LCSC Part Number: C167503; RoHS: Yes; Stock: 262000; Pricing: 2000=0.121, 6000=0.118, 8000=0.117, 20000=0.114, 30000=0.111 (USD); ComponentLink1URL: https://datasheet.ciiva.com/13541/mm8130-260020datasheet-202944-13541575.pdf?src-supplier=Mouser; ComponentLink1Description: https://datasheet.ciiva.com/13541/mm8130-260020datasheet-202944-13541575.pdf?src-supplier=Mouser; ComponentLink2URL: https://datasheet.ciiva.com/14157/04615200-1-14157602.pdf?src-supplier=Distrelec; ComponentLink2Description: https://datasheet.ciiva.com/14157/04615200-1-14157602.pdf?src-supplier=Distrelec; ComponentLink3URL: https://datasheet.ciiva.com/16465/l0391e-16465766.pdf?src-supplier=Future+Electronics; ComponentLink3Description: https://datasheet.ciiva.com/16465/l0391e-16465766.pdf?src-supplier=Future+Electronics
footprint MM8130-2600RA2
pins: 1 IN, 2 OUT, 3 Shield

## MY-2477-02
designator J?
Battery clip Nickel -25℃~+85℃ Phosphor Bronze CR2477 SMD Button And Strip Battery Connector ROHS; Manufacturer: MYOUNG; Manufacturer Part Number: MY-2477-02; Package: SMD; LCSC Part Number: C2979175; Item Type: Battery Connector; ComponentLink1Description: LCSC; ComponentLink1URL: https://www.lcsc.com/product-detail/Button-And-Strip-Battery-Connector_MYOUNG-MY-2477-02_C2979175.html
footprint MY-2477-02
pins: 1 ++, 2 ++, 3 --

## NC5FBV-B
designator J?
XLR Connectors 5P M RECEPT B SER PCBV PN 1 GRD SEP BK; Manufacturer: Neutrik; Manufacturer Part Number: NC5FBV-B; Supplier: Mouser; Supplier Part Number: 568-NC5FBV-B; RoHS: Yes; Item Type: Connectors; Stock: 259; Pricing: 1=8.46, 10=8.46, 50=8.46, 100=8.46, 1000=6.34, 10000=6.34 (USD); ComponentLink1URL: https://datasheet.ciiva.com/30205/nc5fbv-b-neutrik-30205399.pdf?src-supplier=Onlinecomponents.com; ComponentLink1Description: https://datasheet.ciiva.com/30205/nc5fbv-b-neutrik-30205399.pdf?src-supplier=Onlinecomponents.com
footprint NC5FBV-B
pins: 1, 2, 3, 4, 5, G

## NC5MBV-B
designator J?
XLR Connectors 5P M RECEPT B SER PCBV PN 1 GRD SEP BK; Manufacturer: Neutrik; Manufacturer Part Number: NC5MBV-B; Item Type: Audio / Video Connectors; Supplier: Mouser; Supplier Part Number: 568-NC5MBV-B; RoHS: Yes; Stock: 99; Pricing: 1=8.81, 10=8.81, 50=8.81, 100=8.81, 1000=6.68, 10000=6.68 (USD); ComponentLink1URL: https://datasheet.ciiva.com/30093/nc5mbv-b-neutrik-30093926.pdf?src-supplier=Onlinecomponents.com; ComponentLink1Description: https://datasheet.ciiva.com/30093/nc5mbv-b-neutrik-30093926.pdf?src-supplier=Onlinecomponents.com
footprint NC5MBV-B
pins: 1, 2, 3, 4, 5, G

## NE8FBV-C5-LED
designator J?
Modular Connectors / Ethernet Connectors RECP CAT5e B series PCBV, 24mm FP to PCB; Manufacturer: Neutrik; Manufacturer Part Number: NE8FBV-C5-LED; Item Type: Modular / Ethernet Connectors; Supplier: Mouser; Supplier Part Number: 568-NE8FBV-C5-LED; RoHS: Yes; Stock: 1959; Pricing: 1=12.51, 10=11.24, 50=11.24, 100=9.55, 1000=9.54, 10000=9.54 (USD); ComponentLink1URL: http://www.alliedelec.com/images/products/datasheets/bm/NEUTRIK_PRODUCTS/70624710.pdf?src-supplier=Allied+Electronics; ComponentLink1Description: http://www.alliedelec.com/images/products/datasheets/bm/NEUTRIK_PRODUCTS/70624710.pdf?src-supplier=Allied+Electronics; ComponentLink2URL: http://www.farnell.com/datasheets/2040666.pdf?src-supplier=Element14; ComponentLink2Description: http://www.farnell.com/datasheets/2040666.pdf?src-supplier=Element14; ComponentLink3URL: https://datasheet.octopart.com/NE8FBV-C5-LED-Neutrik-datasheet-62313259.pdf?src-supplier=Newark; ComponentLink3Description: https://datasheet.octopart.com/NE8FBV-C5-LED-Neutrik-datasheet-62313259.pdf?src-supplier=Newark
footprint NE8FBV-C5-LED
pins: 1, 2, 3, 4, 5, 6, 7, 8, G (power)

## PJ-051AH
designator J?
CONN PWR JACK 2X5.5MM SOLDER; Manufacturer: CUI Devices; Manufacturer Part Number: PJ-051AH; Item Type: Power Connectors; Supplier: Digikey; LCSC Part Number: C22359773; RoHS: Yes; Stock: 42904; Pricing: 1=1.1, 10=0.839, 25=0.754, 50=0.6964, 100=0.6438, 250=0.58156, 500=0.53948, 1000=0.50126, 2500=0.45618 (USD); ComponentLink1URL: https://www.cuidevices.com/product/resource/digikeypdf/pj-051ah.pdf?src-supplier=Digikey; ComponentLink1Description: https://www.cuidevices.com/product/resource/digikeypdf/pj-051ah.pdf?src-supplier=Digikey; ComponentLink2URL: https://datasheet.octopart.com/PJ-051AH-CUI-Devices-datasheet-137760691.pdf?src-supplier=Future+Electronics; ComponentLink2Description: https://datasheet.octopart.com/PJ-051AH-CUI-Devices-datasheet-137760691.pdf?src-supplier=Future+Electronics; ComponentLink3URL: https://datasheet.octopart.com/PJ-051AH-CUI-Devices-datasheet-141000361.pdf?src-supplier=Master+Electronics; ComponentLink3Description: https://datasheet.octopart.com/PJ-051AH-CUI-Devices-datasheet-141000361.pdf?src-supplier=Master+Electronics
footprint PJ-051AH
pins: 1, 2, 3, S1 SHIELD, S2 SHIELD

## PJ-332A-6A
designator J?
-25℃~+80℃ 3.5mm Headphone Jack 30V 1A SMD Audio Connectors ROHS; Manufacturer: Korean Hroparts Elec; Manufacturer Part Number: PJ-332A-6A; Package: SMD; LCSC Part Number: C2848643; Item Type: Audio Connector; ComponentLink1Description: LCSC; ComponentLink1URL: https://lcsc.com/product-detail/Audio-Connectors_Korean-Hroparts-Elec-PJ-332A-6A_C2848643.html?s_z=n_PJ332A
footprint PJ-332A-6A
pins: 1, 2, 3, 4, 5, 6

## PJ-3582-B
designator J?
20℃~+70℃ 3.5mm Headphone Jack 235℃ 30V 500mA Plugin Audio Connectors (Headphones) ROHS; Manufacturer: XKB Connection; Manufacturer Part Number: PJ-3582-B; Package: Plugin; LCSC Part Number: C500090; Item Type: Audio Connectors; ComponentLink1Description: LCSC; ComponentLink1URL: https://www.lcsc.com/product-detail/Audio-Connectors-Headphones_XKB-Connection-PJ-3582-B_C500090.html
footprint PJ-3582-B
pins: 2, 3, 4, 5, 6

## R-RJ11R04P-A802
designator J?
RJ11Receptacle 1 Plugin Ethernet Connectors / Modular Connectors (RJ45 RJ11) ROHS; Manufacturer: Ckmtw(Shenzhen Cankemeng); Manufacturer Part Number: R-RJ11R04P-A802; Package: Plugin; LCSC Part Number: C189737; Item Type: (RJ45 RJ11); ComponentLink1Description: LCSC; ComponentLink1URL: https://www.lcsc.com/product-detail/Ethernet-Connectors-Modular-Connectors-RJ45-RJ11_Ckmtw-Shenzhen-Cankemeng-R-RJ11R04P-A802_C189737.html
footprint R-RJ11R04P-A802
pins: 1 T+, 2 R-, 3 T+, 4 R-

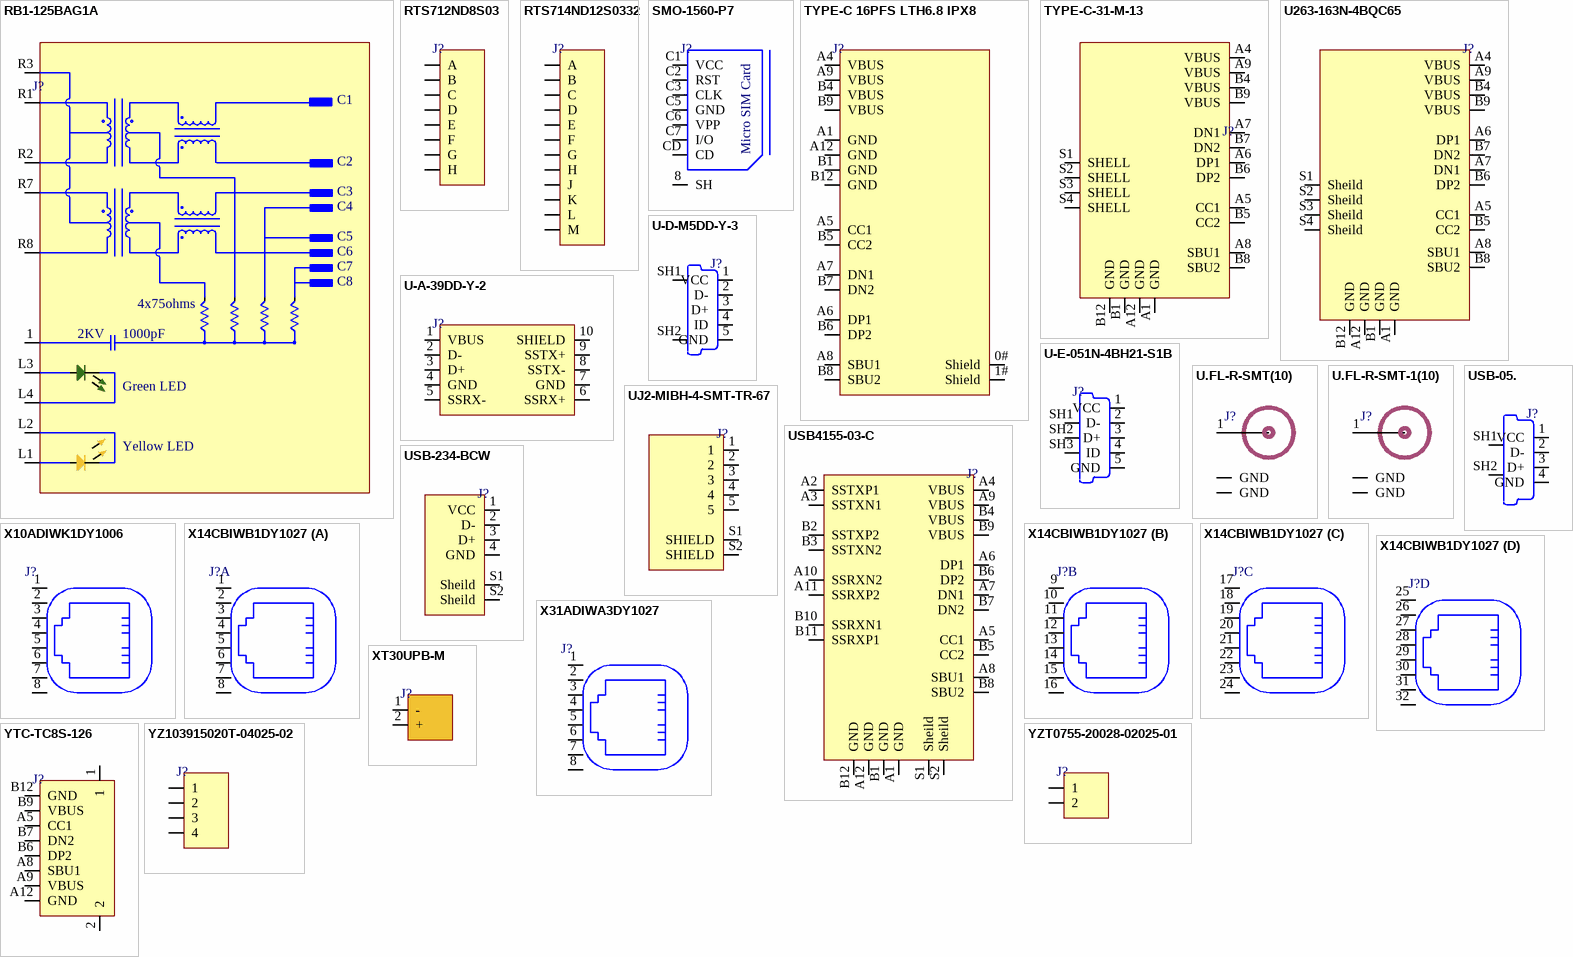
[diagram p2: symbols RB1-125BAG1A to YZT0755-20028-02025-01]

## RB1-125BAG1A
designator J?
CONN JACK 1PORT 100 BASE-T PCB; Manufacturer: WIZnet; Manufacturer Part Number: RB1-125BAG1A; Item Type: Modular / Ethernet Connectors; Number of Contacts: 8NUMBER; Supplier: Mouser; LCSC Part Number: C910370; RoHS: Yes; Stock: 2180; Pricing: 1=3.94, 10=3.12, 50=2.48, 100=2.48, 1000=2.06, 10000=2.06 (USD); Height: 15.1mm; Lead Free: 5697LeadFree; ComponentLink1URL: https://datasheet.ciiva.com/16480/rb1-125bag1a-16480451.pdf?src-supplier=Future+Electronics; ComponentLink1Description: https://datasheet.ciiva.com/16480/rb1-125bag1a-16480451.pdf?src-supplier=Future+Electronics; ComponentLink2URL: https://datasheet.ciiva.com/6930/rb1-125bag1a-approvalsheet-6930969.pdf?src-supplier=Digikey; ComponentLink2Description: https://datasheet.ciiva.com/6930/rb1-125bag1a-approvalsheet-6930969.pdf?src-supplier=Digikey; ComponentLink3URL: https://datasheet.ciiva.com/15367/rb1-125bag1a111-00-224696-15367787.pdf?src-supplier=Mouser; ComponentLink3Description: https://datasheet.ciiva.com/15367/rb1-125bag1a111-00-224696-15367787.pdf?src-supplier=Mouser; ComponentLink4URL: https://datasheet.ciiva.com/19455/2132875-19455478.pdf?src-supplier=Jameco; ComponentLink4Description: https://datasheet.ciiva.com/19455/2132875-19455478.pdf?src-supplier=Jameco
footprint RB1-125BAG1A
pins: 1 P1 (power), L1 ANODE, L2 CATHODE, L3 ANODE, L4 CATHODE, R1, R2, R3, R7, R8
text: C1; C2; C3; C4; C5; C6; C7; C8; 4x75ohms; 2KV; 1000pF; Green LED; Yellow LED

## RTS712ND8S03
designator J?
CONN RCPT FMALE 8POS GOLD SOLDER; Manufacturer: Amphenol; Manufacturer Part Number: RTS712ND8S03; Supplier: Digikey; Supplier Part Number: 889-RTS712ND8S03-ND; RoHS: No; Category: Circular Connectors; Stock: 161; Pricing: 1=23.88, 10=20.298, 25=19.0268, 50=18.1188, 100=17.2547, 300=15.969, 500=15.4044 (USD)
footprint RTS712ND8S03
pins: A, B, C, D, E, F, G, H

## RTS714ND12S0332
designator J?
CONN RCPT FMALE 12P GOLD SOLDER; Manufacturer: Amphenol Sine Systems; Manufacturer Part Number: RTS714ND12S0332; Item Type: Circular Connectors; Connector Type: 5778ConnectorType; Gender: 30Gender; Number of Positions: 19NUMBER; Supplier: Digikey; Supplier Part Number: 889-RTS714ND12S0332-ND; RoHS: No; Stock: 171; Pricing: 1=37.04, 10=31.479, 25=29.5084, 50=28.1004, 100=26.7605, 300=24.76707 (USD)
footprint RTS714ND12S0332
pins: A, B, C, D, E, F, G, H, J, K, L, M

## SMO-1560-P7
designator J?
Self-bouncing 1.5mm Card Slot -40℃~+85℃ MicroSIM Card SMD SIM Card Connectors ROHS; Manufacturer: Hanbo Electronic; Manufacturer Part Number: SMO-1560-P7; Package: SMD; LCSC Part Number: C961688; Item Type: SIM Card Connector; ComponentLink1Description: LCSC; ComponentLink1URL: https://www.lcsc.com/product-detail/SIM-Card-Connectors_Hanbo-Electronic-SMO-1560-P7_C961688.html?s_z=n_SMO-1560-P7
footprint SMO-1560-P7
pins: 8 SH, C1 VCC, C2 RST, C3 CLK, C5 GND, C6 VPP, C7 I/O, CD
text: Micro SIM Card

## TYPE-C 16PFS LTH6.8 IPX8
designator J?
USB 3.1 3A 1 Standing paste 16P Mother -35℃~+85℃ Type-C SMD USB Connectors ROHS; Manufacturer: SHOU HAN; Manufacturer Part Number: TYPE-C 16PFS LTH6.8 IPX8; Package: SMD; LCSC Part Number: C3020049; Item Type: USB Connector; ComponentLink1Description: LCSC; ComponentLink1URL: https://www.lcsc.com/product-detail/USB-Connectors_SHOU-HAN-TYPE-C-16PFS-LTH6-8-IPX8_C3020049.html
footprint TYPE-C 16PFS LTH6.8 IPX8
pins: 0# Shield, 1# Shield, A1 GND, A4 VBUS, A5 CC1, A6 DP1, A7 DN1, A8 SBU1, A9 VBUS, A12 GND, B1 GND, B4 VBUS, B5 CC2, B6 DP2, B7 DN2, B8 SBU2, B9 VBUS, B12 GND

## TYPE-C-31-M-13
designator J?
1 12P Female Type-C SMD USB Connectors ROHS; Manufacturer: Korean Hroparts Elec; Manufacturer Part Number: TYPE-C-31-M-13; Item Type: USB Type-C  Connector; Package: SMD; LCSC Part Number: C223906; ComponentLink1Description: LCSC; ComponentLink1URL: https://www.lcsc.com/product-detail/USB-Connectors_Korean-Hroparts-Elec-TYPE-C-31-M-13_C223906.html?s_z=n_TYPE-C-31-M-13
footprint TYPE-C-31-M-13
pins: A1 GND, A4 VBUS, A5 CC1, A6 DP1, A7 DN1, A8 SBU1, A9 VBUS, A12 GND, B1 GND, B4 VBUS, B5 CC2, B6 DP2, B7 DN2, B8 SBU2, B9 VBUS, B12 GND, S1 SHELL, S2 SHELL, S3 SHELL, S4 SHELL

## U263-163N-4BQC65
designator J?
5A 1 16P Mother -25℃~+85℃ Type-C SMD USB Connectors ROHS; Manufacturer: XKB Connection; Manufacturer Part Number: U263-163N-4BQC65; Package: SMD; LCSC Part Number: C2938598; Item Type: USB Connectors; ComponentLink1Description: LCSC; ComponentLink1URL: https://www.lcsc.com/product-detail/USB-Connectors_XKB-Connection-U263-163N-4BQC65_C2938598.html
footprint U263-163N-4BQC65
pins: A1 GND, A4 VBUS, A5 CC1, A6 DP1, A7 DN1, A8 SBU1, A9 VBUS, A12 GND, B1 GND, B4 VBUS, B5 CC2, B6 DP2, B7 DN2, B8 SBU2, B9 VBUS, B12 GND, S1 Sheild, S2 Sheild, S3 Sheild, S4 Sheild

## U-A-39DD-Y-2
designator J?
USB 3.0 1.8A 1 Bend-in 9P Female Type-A Plugin USB Connectors ROHS; Manufacturer: Korean Hroparts Elec; Manufacturer Part Number: U-A-39DD-Y-2; Package: Plugin; LCSC Part Number: C707319; Item Type: USB Connector; ComponentLink1Description: LCSC; ComponentLink1URL: https://www.lcsc.com/product-detail/USB-Connectors_Korean-Hroparts-Elec-U-A-39DD-Y-2_C707319.html
footprint U-A-39DD-Y-2
pins: 1 VBUS, 2 D-, 3 D+, 4 GND, 5 SSRX-, 6 SSRX+, 7 GND, 8 SSTX-, 9 SSTX+, 10 SHIELD

## U-D-M5DD-Y-3
designator J?
1A USB 2.0 1 Direct Insert 5P Female Micro-B Plugin USB Connectors ROHS; Manufacturer: HRO Electronics; Manufacturer Part Number: U-D-M5DD-Y-3; Item Type: USB Micro B; Supplier: LCSC; LCSC Part Number: C707313; RoHS: No; Stock: 110; Pricing: 5=0.2652, 50=0.2088, 150=0.1847, 500=0.1519, 2500=0.1385, 5000=0.1304 (USD)
footprint U-D-M5DD-Y-3
pins: 1 VCC, 2 D- "USB Data - [White]", 3 D+, 4 ID "USB Data + [Green]", 5 GND, SH1 Sheild "Shell", SH2 Sheild "Shell"

## U-E-051N-4BH21-S1B
designator J?
3A 1 5P Mother -40℃~+85℃ Micro-B SMD USB Connectors ROHS; Manufacturer: XKB Connection; Manufacturer Part Number: U-E-051N-4BH21-S1B; Package: SMD; LCSC Part Number: C319153; Item Type: USB Connectors; ComponentLink1Description: LCSC; ComponentLink1URL: https://www.lcsc.com/product-detail/USB-Connectors_XKB-Connection-U-E-051N-4BH21-S1B_C319153.html
footprint U-E-051N-4BH21-S1B
pins: 1 VCC, 2 D- "USB Data - [White]", 3 D+, 4 ID "USB Data + [Green]", 5 GND, SH1 Sheild "Shell", SH2 Sheild "Shell", SH3 Sheild "Shell"

## U.FL-R-SMT(10)
designator J?
CONN U.FL RCPT STR 50 OHM SMD; Manufacturer: Hirose; Manufacturer Part Number: U.FL-R-SMT(10); Item Type: RF / Coaxial Connectors; Body Material: Bronze; Body Plating: Silver; Dielectric Material: Polymer; Center Contact Plating: Gold; Impedance: 50R; Connector Type: Receptacle,Coaxial,Male Pin; Clock Frequency: 6GHz; Number of Ports: 1; Mating Cycles: 30; Number of Contacts: 3NUMBER; Operating Frequency: 0 to 6 GHz; Current Rating: 3A; Supplier: Digikey; LCSC Part Number: C434808; RoHS: Yes; Stock: 20830; Pricing: 1=1.2, 10=0.975, 25=0.8992, 50=0.8454, 100=0.7949, 250=0.7328, 500=0.6891, 1000=0.64802 (USD); Mounting Technology: Surface Mount; Case/Package: SMD/SMT; Contact Material: Brass; Housing Color: Beige; Contact Plating: Gold; Plating: Silver; Color: 46Colour; Min Operating Temperature: -40°C; Max Operating Temperature: 90°C; Package Quantity: 1; Fastening Type: SNAP-ON; Packaging: Tape and Reel; Termination: Solder; Orientation: Vertical; Series: U.FL; Length: 3mm; Depth: 3.1mm; Lead Pitch: 2.54mm; Radiation Hardening: No; Lead Free: Lead Free; RoHS Compliant: Yes; ComponentLink1URL: https://datasheet.ciiva.com/15173/getdatasheetpartid-449682-15173227.pdf?src-supplier=Verical; ComponentLink1Description: https://datasheet.ciiva.com/15173/getdatasheetpartid-449682-15173227.pdf?src-supplier=Verical
footprint U.FL-R-SMT(10)
pins: 1 RF_IN, 2 GND, 3 GND

## U.FL-R-SMT-1(10)
designator J?
CONN U.FL RCPT STR 50 OHM SMD; Manufacturer: Hirose; Manufacturer Part Number: U.FL-R-SMT-1(10); Item Type: RF / Coaxial Connectors; Body Material: Bronze; Body Plating: Silver; Dielectric Material: Polymer; Center Contact Plating: Gold; Impedance: 50R; Connector Type: Receptacle,Male Pin; Clock Frequency: 6GHz; Insulation Resistance: 500MR; Number of Ports: 1; Mating Cycles: 30; Number of Contacts: 1NUMBER; Voltage Rating: 60V; Supplier: Digikey; LCSC Part Number: C88373; RoHS: Yes; Stock: 48; Pricing: 1=1.2, 10=0.975, 25=0.8992, 50=0.8454, 100=0.7949, 250=0.7328, 500=0.6891, 1000=0.64802 (USD); Mounting Technology: Surface Mount; Pins: 2NUMBER; Contact Material: Brass; Housing Color: Beige; Weight: 0.001764oz; Min Operating Temperature: -40°C; Max Operating Temperature: 90°C; Packaging: Tape and Reel; Package Quantity: 2500; Fastening Type: SNAP-ON; Termination: Solder; Orientation: Straight; Series: U.FL; RoHS Compliant: Yes; Lead Free: 5697LeadFree; ComponentLink1URL: https://datasheet.ciiva.com/11762/0900766b8105243f-11762474.pdf?src-supplier=Rs; ComponentLink1Description: https://datasheet.ciiva.com/11762/0900766b8105243f-11762474.pdf?src-supplier=Rs; ComponentLink2URL: https://datasheet.ciiva.com/7651/91524-7651914.pdf?src-supplier=Element14; ComponentLink2Description: https://datasheet.ciiva.com/7651/91524-7651914.pdf?src-supplier=Element14; ComponentLink3URL: https://datasheet.ciiva.com/7651/91524-7651915.pdf?src-supplier=Element14; ComponentLink3Description: https://datasheet.ciiva.com/7651/91524-7651915.pdf?src-supplier=Element14
footprint U.FL-R-SMT-1(10)
pins: 1 RF_IN, 2 GND, 3 GND

## UJ2-MIBH-4-SMT-TR-67
designator J?
CONN RCPT USB2.0 MICRO B SMD R/A; Manufacturer: CUI Devices; Manufacturer Part Number: UJ2-MIBH-4-SMT-TR-67; Item Type: USB Connectors; Supplier: Digikey; LCSC Part Number: C22359766; RoHS: Yes; Stock: 31220; Pricing: 1=4.21, 10=3.219, 25=2.9012, 50=2.6858, 100=2.4899, 250=2.25836, 500=2.1021 (USD); ComponentLink1URL: https://www.cuidevices.com/product/resource/digikeypdf/uj2-mibh-4-smt-tr-67.pdf?src-supplier=Digikey; ComponentLink1Description: https://www.cuidevices.com/product/resource/digikeypdf/uj2-mibh-4-smt-tr-67.pdf?src-supplier=Digikey; ComponentLink2URL: https://datasheet.octopart.com/UJ2-MIBH-4-SMT-TR-67-CUI-Devices-datasheet-154834583.pdf?src-supplier=Electro+Sonic; ComponentLink2Description: https://datasheet.octopart.com/UJ2-MIBH-4-SMT-TR-67-CUI-Devices-datasheet-154834583.pdf?src-supplier=Electro+Sonic
footprint UJ2-MIBH-4-SMT-TR-67
pins: 1, 2, 3, 4, 5, S1 SHIELD, S2 SHIELD

## USB4155-03-C
designator J?
USB Connectors USB Type C, Plug, SMT , G/F, Right Angled Mount, T R; Manufacturer: Global Connector Technology; Manufacturer Part Number: USB4155-03-C; Supplier: Digikey; Supplier Part Number: 2073-USB4155-03-CCT-ND; RoHS: No; Category: USB Connectors; Stock: 334; Pricing: 1=1.61, 10=1.371, 25=1.2856, 50=1.224, 100=1.1654, 250=1.0924, 500=1.04024 (USD); ComponentLink1URL: https://datasheet.octopart.com/USB4155-03-C-Global-Connector-Technology-datasheet-169726654.pdf?src-supplier=Future+Electronics; ComponentLink1Description: https://datasheet.octopart.com/USB4155-03-C-Global-Connector-Technology-datasheet-169726654.pdf?src-supplier=Future+Electronics; LCSC Part Number: C5183853; Item Type: Connector
footprint USB4155-03-C
pins: A1 GND, A2 SSTXP1, A3 SSTXN1, A4 VBUS, A5 CC1, A6 DP1, A7 DN1, A8 SBU1, A9 VBUS, A10 SSRXN2, A11 SSRXP2, A12 GND, B1 GND, B2 SSTXP2, B3 SSTXN2, B4 VBUS, B5 CC2, B6 DP2, B7 DN2, B8 SBU2, B9 VBUS, B10 SSRXN1, B11 SSRXP1, B12 GND, S1 Sheild, S2 Sheild

## USB-05.
designator J?
USB 2.0 1 4P Public Type-A Plugin USB Connectors ROHS; Manufacturer: SOFNG; Manufacturer Part Number: USB-05; Package: Plugin; LCSC Part Number: C112454; Item Type: USB 2.0 1 4P Public Type-A Plugin USB Connectors ROHS; ComponentLink1Description: LCSC; ComponentLink1URL: https://www.lcsc.com/product-detail/USB-Connectors_SOFNG-USB-05_C112454.html
footprint USB-05.
pins: 1 VCC, 2 D- "USB Data - [White]", 3 D+, 4 GND, SH1 Sheild "Shell", SH2 Sheild "Shell"

## USB-234-BCW
designator J?
1.5A USB 2.0 1 Horizontal attachment 4P Female -20℃~+70℃ Type-A SMD USB Connectors ROHS; Manufacturer: XUNPU; Manufacturer Part Number: USB-234-BCW; Package: SMD; LCSC Part Number: C720528; Item Type: USB Connector; ComponentLink1Description: LCSC; ComponentLink1URL: https://www.lcsc.com/product-detail/USB-Connectors_XUNPU-USB-234-BCW_C720528.html?s_z=n_USB-234-BCW
footprint USB-234-BCW
pins: 1 VCC, 2 D- "USB Data - [White]", 3 D+, 4 GND, S1 Sheild "Shell", S2 Sheild "Shell"

## X10ADIWK1DY1006
designator J?
RJ45Receptacle Unshielded 1 Bend-in Gold Phosphor Bronze Without LED -40℃~+85℃ Plugin Ethernet Connectors / Modular Connectors (RJ45 RJ11) ROHS; Manufacturer: XKB Connection; Manufacturer Part Number: X10ADIWK1DY1006; Package: Plugin; LCSC Part Number: C2916456; Item Type: Connectors (RJ45 RJ11); ComponentLink1Description: LCSC; ComponentLink1URL: https://www.lcsc.com/product-detail/Ethernet-Connectors-Modular-Connectors-RJ45-RJ11_XKB-Connection-X10ADIWK1DY1006_C2916456.html
footprint X10ADIWK1DY1006
pins: 1, 2, 3, 4, 5, 6, 7, 8

## X14CBIWB1DY1027
designator J?
RJ45Receptacle 4 Unshielded Bend-in Gold Phosphor Bronze Without LED -40℃~+85℃ Plugin Ethernet Connectors / Modular Connectors (RJ45 RJ11) ROHS; Manufacturer: XKB Connection; Manufacturer Part Number: X14CBIWB1DY1027; Package: Plugin; LCSC Part Number: C2931489; Item Type: Connectors (RJ45 RJ11); ComponentLink1Description: LCSC; ComponentLink1URL: https://www.lcsc.com/product-detail/Ethernet-Connectors-Modular-Connectors-RJ45-RJ11_XKB-Connection-X14CBIWB1DY1027_C2931489.html
footprint X14CBIWB1DY1027
part A pins: 1, 2, 3, 4, 5, 6, 7, 8
part B pins: 9, 10, 11, 12, 13, 14, 15, 16
part C pins: 17, 18, 19, 20, 21, 22, 23, 24
part D pins: 25, 26, 27, 28, 29, 30, 31, 32

## X31ADIWA3DY1027
designator J?
RJ45Receptacle Unshielded 1 Bend-in Gold Phosphor Bronze Without LED -40℃~+85℃ Plugin Ethernet Connectors / Modular Connectors (RJ45 RJ11) ROHS; Manufacturer: XKB Connection; Manufacturer Part Number: X31ADIWA3DY1027; Package: Plugin; LCSC Part Number: C2916457; Item Type: Connectors (RJ45 RJ11); ComponentLink1Description: LCSC; ComponentLink1URL: https://www.lcsc.com/product-detail/Ethernet-Connectors-Modular-Connectors-RJ45-RJ11_XKB-Connection-X31ADIWA3DY1027_C2916457.html
footprint X31ADIWA3DY1027
pins: 1, 2, 3, 4, 5, 6, 7, 8

## XT30UPB-M
designator J?
Plug; Manufacturer: Changzhou Amass Elec; Manufacturer Part Number: XT30UPB-M; Package: -; LCSC Part Number: C428721; Item Type: Plug; ComponentLink1Description: LCSC; ComponentLink1URL: https://www.lcsc.com/product-detail/plug_Changzhou-Amass-Elec-XT30UPB-M_C428721.html
footprint XT30UPB-M
pins: 1 -, 2 +

## YTC-TC8S-126
designator J?
5A 1 Standing paste 8P Mother -20℃~+85℃ Type-C SMD USB Connectors ROHS; Manufacturer: YIYUAN; Manufacturer Part Number: YTC-TC8S-126; Package: SMD; LCSC Part Number: C2927290; Item Type: Type-C SMD USB Connector; ComponentLink1Description: LCSC; ComponentLink1URL: https://www.lcsc.com/product-detail/USB-Connectors_YIYUAN-YTC-TC8S-126_C2927290.html
footprint YTC-TC8S-126
pins: 1, 2, A5 CC1, A8 SBU1, A9 VBUS, A12 GND, B6 DP2, B7 DN2, B9 VBUS, B12 GND

## YZ103915020T-04025-02
designator J?
Brass 2.54mm -40℃~+85℃ Magnetic Spring Pogo Pin Receptacle 2mm 4P 50mΩ 10,000 Cycles Gold Pogo Pin Spring Probe Connector ROHS; Manufacturer: Xinyangze; Manufacturer Part Number: YZ103915020T-04025-02; Package: Custom; LCSC Part Number: C6276862; Item Type: POGO Pin; ComponentLink1Description: LCSC; ComponentLink1URL: https://www.lcsc.com/product-detail/C6276862.html?s_z=n_pogo
footprint YZ103915020T-04025-02
pins: 1, 2, 3, 4

## YZT0755-20028-02025-01
designator J?
Brass 2.5mm -20℃~+70℃ 2.8mm 2P Magnetic Spring Pogo Pin Receptacle Gold Pogo Pin Spring Probe Connector ROHS; Manufacturer: Xinyangze; Manufacturer Part Number: YZT0755-20028-02025-01; Item Type: POGO CONNECTOR; Package: Custom; LCSC Part Number: C5280828; ComponentLink1Description: LCSC; ComponentLink1URL: https://www.lcsc.com/product-detail/C5280828.html
footprint YZT0755-20028-02025-01
pins: 1, 2